# Altium footprint library CAP1206.PcbLib: 1 footprints
Each footprint in its own frame and in the unit in brackets; x right, y up, seen from the top. Pads: shape width x height; smd on the part's side, far side on the other; paste and mask are expansions set on the pad; w line width, h text height; cw(c..) or ccw(c..) is an arc to the next point about the centre after c.
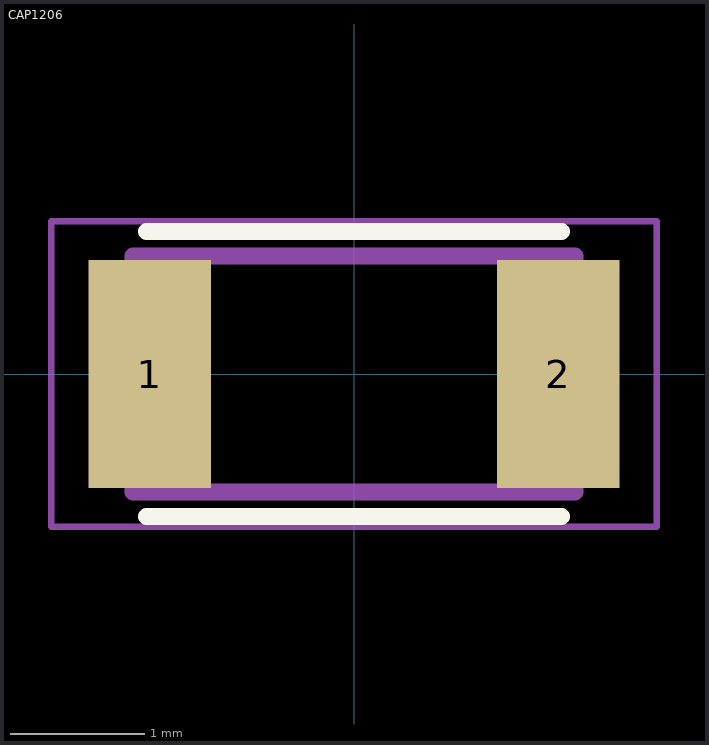
[diagram p0: the footprint, top view; thin cyan lines are the x and y axes]

## CAP1206 [mil] "CAPC3115X65N"
pads (2):
  rect 36x67 smd: 1(-60,0) 2(60,0)
Top Overlay:
  lines w5: -61.02,-41.93 61.02,-41.93 ; -61.02,41.93 61.02,41.93
Mechanical 13:
  lines w5: -64.96,-34.65 -64.96,34.65 64.96,34.65 64.96,-34.65 -64.96,-34.65
Mechanical 15:
  lines w1.97: -88.98,-44.88 -88.98,44.88 88.98,44.88 88.98,-44.88 -88.98,-44.88
3D body "CAP1206.step": height 39.37, standoff 0, extent -62.99,-31.5 62.99,31.5